# Altium schematic symbol library LSR976.SchLib: 1 symbol
Pins are listed as number, name and electrical type; pins without a type are passive.

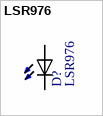
[diagram p0: symbol LSR976]

## LSR976
designator D?
SMD LED [Osram Semiconductors] LSR976 SMD LED; MF: OSRAM Opto; Package: 0805 Osram; Price: None; MP: LSR976; Availability: Unavailable; SnapEDA_Link: https://www.snapeda.com/parts/LSR976/OSRAM%20Opto%20Semiconductors%20Inc./view-part/?ref=snap; Value: *
footprint *0805_R_LSR976(Primary)
pins: A, C